# EAGLE library part HDR-2X05 (library connectors)
Pin header 2 x 5
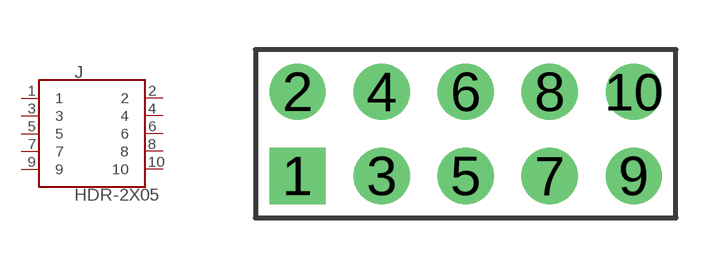
[diagram p5: symbol with the pads of HDR-2X05; footprint HDR-2X05]

Designator prefix J

## HDR-2X05  [HDR-2X05]
1  1  pas
2  2  pas
3  3  pas
4  4  pas
5  5  pas
6  6  pas
7  7  pas
8  8  pas
9  9  pas
10  10  pas

## Footprint HDR-2X05 (pad centres in mm)
Pin header, 2 rows of 5, pitch 2.54 mm. Sizes: 0.1 inch (2.54 mm) pin strip grid; pads worked out for this kit. Not verified against a datasheet.
drill 1 pad 1.7 square: 1 -5.08,-1.27
drill 1 pad 1.7: 2 -5.08,1.27; 3 -2.54,-1.27; 4 -2.54,1.27; 5 0,-1.27; 6 0,1.27; 7 2.54,-1.27; 8 2.54,1.27; 9 5.08,-1.27; 10 5.08,1.27